# Altium footprint library SU9VF05030.PcbLib: 1 footprints
Each footprint in its own frame and in the unit in brackets; x right, y up, seen from the top. Pads: shape width x height; smd on the part's side, far side on the other; paste and mask are expansions set on the pad; w line width, h text height; cw(c..) or ccw(c..) is an arc to the next point about the centre after c.
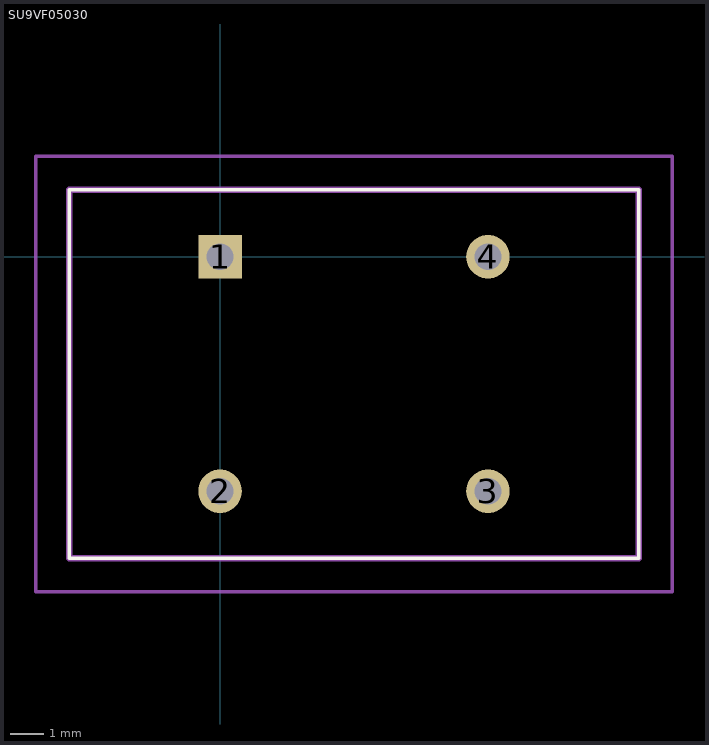
[diagram p0: the footprint, top view; thin cyan lines are the x and y axes]

## SU9VF05030 [mm]
pads (4):
  rect 1.3x1.3 hole 0.8: 1(0,0)
  round 1.3 hole 0.8: 2(0,-7) 3(8,-7) 4(8,0)
Top Overlay:
  lines w0.1: -4.5,-9 12.5,-9 12.5,2 -4.5,2 -4.5,-9
Mechanical 15:
  lines w0.2: -4.5,-9 12.5,-9 12.5,2 -4.5,2 -4.5,-9
Mechanical 20:
  lines w0.1: -5.5,-10 13.5,-10 13.5,3 -5.5,3 -5.5,-10